# Altium schematic symbol library RC0603FR-0720KL.SchLib: 1 symbol
Pins are listed as number, name and electrical type; pins without a type are passive.

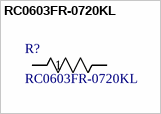
[diagram p0: symbol RC0603FR-0720KL]

## RC0603FR-0720KL
designator R?
No Description Available; Manufacturer_Name: Yageo; Copyright: Copyright (C) 2026 Ultra Librarian. All rights reserved.; Manufacturer_Part_Number: RC0603FR-0720KL
footprint RES_RC0603_YAG
pins: 1, 2